# Altium footprint library Connectors.PcbLib: 228 footprints (part 11 of 15)
Each footprint in its own frame and in the unit in brackets; x right, y up, seen from the top. Pads: shape width x height; smd on the part's side, far side on the other; paste and mask are expansions set on the pad; w line width, h text height; cw(c..) or ccw(c..) is an arc to the next point about the centre after c.
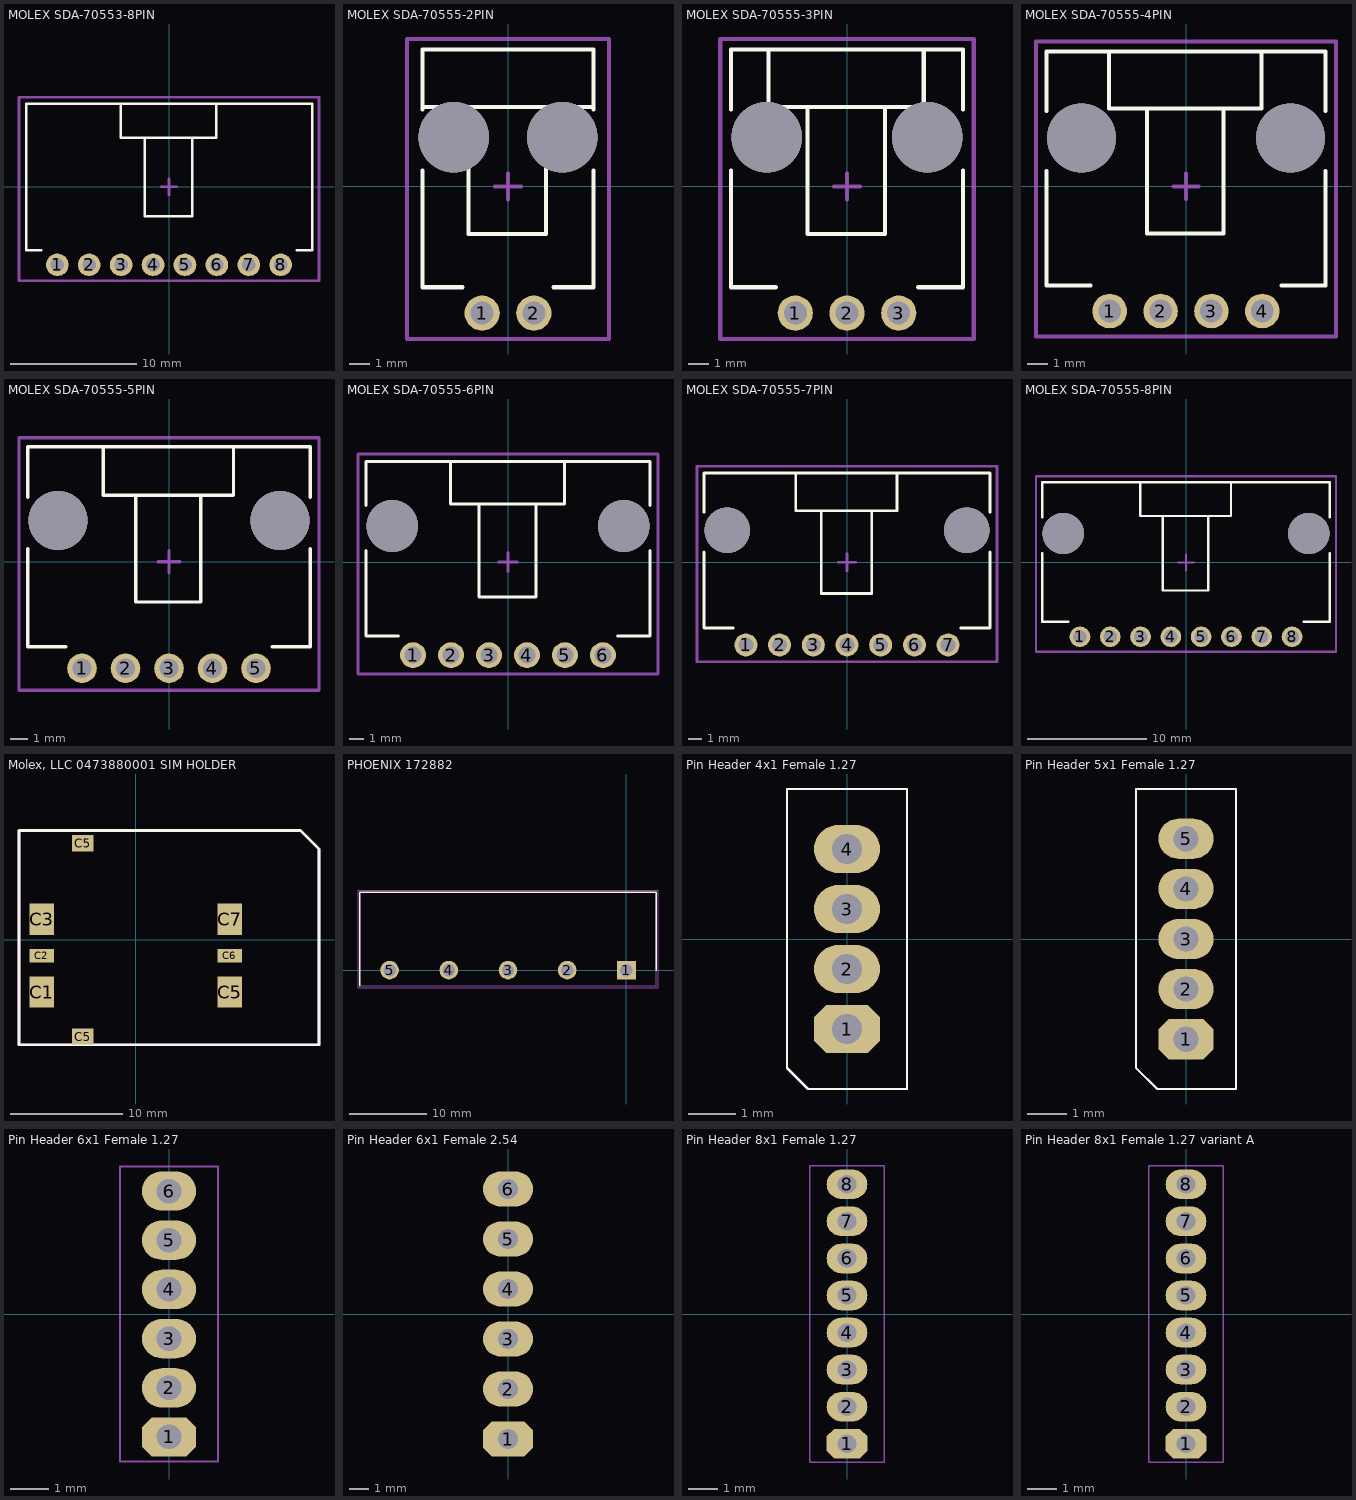
[diagram p10: the footprints below, top view; thin cyan lines are the x and y axes]

## MOLEX SDA-70553-8PIN [mm] "SL Right angle header with latch, 0.100 centres, SDA-70553"
height 6.99
pads (8):
  round 1.8 hole 1.09: 1(-8.89,-6.223) 2(-6.35,-6.223) 3(-3.81,-6.223) 4(-1.27,-6.223) 5(1.27,-6.223) 6(3.81,-6.223) 7(6.35,-6.223) 8(8.89,-6.223)
Top Overlay:
  lines w0.2: -10.16,-5.08 -11.343,-5.08 -11.343,-4.973 -11.343,6.604 11.39,6.604 11.39,-4.973 11.39,-5.08 10.16,-5.08 ; -3.85,6.55 -3.85,3.892 3.77,3.892 3.77,6.55 ; -1.945,3.892 -1.945,-2.346 1.865,-2.346 1.865,3.892
Top Courtyard:
  lines w0.2: -0.635,0 0.635,0 ; 0,-0.635 0,0.635 ; -11.938,-7.493 -11.938,7.112 11.938,7.112 11.938,-7.493 -11.938,-7.493
3D body "705530007.STEP": height 6.96, standoff -3.32, extent -11.39,-6.973 11.47,6.616

## MOLEX SDA-70555-2PIN [mm] "SL Right Angle Header W/LAtch & Trip-Pegs 2.54mm Centres"
height 6.99
pads (2):
  round 1.73 hole 1.13: 1(-1.27,-6.223) 2(1.27,-6.223)
via -2.67,2.417 diameter 3.45 hole 3.45
via 2.67,2.417 diameter 3.45 hole 3.45
Top Overlay:
  lines w0.2: -4.191,0.777 -4.191,-4.953 -2.23,-4.953 ; -4.191,3.777 -4.191,6.731 4.191,6.731 4.191,3.777 ; -4.191,3.892 4.191,3.892 ; -1.945,3.892 -1.945,-2.346 1.865,-2.346 1.865,3.892 ; 2.23,-4.953 4.191,-4.953 4.191,0.777
Top Courtyard:
  lines w0.2: -0.635,0 0.635,0 ; 0,-0.635 0,0.635 ; -4.953,-7.493 -4.953,7.239 4.953,7.239 4.953,-7.493 -4.953,-7.493
3D body "705550001.STEP": height 6.98, standoff -3.3, extent -4.191,-6.923 4.191,6.666

## MOLEX SDA-70555-3PIN [mm] "SL Right Angle Header W/LAtch & Trip-Pegs 2.54mm Centres"
height 6.99
pads (3):
  round 1.73 hole 1.13: 1(-2.54,-6.223) 2(0,-6.223) 3(2.54,-6.223)
via -3.94,2.417 diameter 3.45 hole 3.45
via 3.94,2.417 diameter 3.45 hole 3.45
Top Overlay:
  lines w0.2: -5.7,0.777 -5.7,-4.953 -3.5,-4.953 ; -5.7,3.777 -5.7,6.731 5.7,6.731 5.7,3.777 ; -3.85,6.731 -3.85,3.892 3.77,3.892 3.77,6.731 ; -1.945,3.892 -1.945,-2.346 1.865,-2.346 1.865,3.892 ; 3.5,-4.953 5.7,-4.953 5.7,0.777
Top Courtyard:
  lines w0.2: -0.635,0 0.635,0 ; 0,-0.635 0,0.635 ; -6.223,-7.493 -6.223,7.239 6.223,7.239 6.223,-7.493 -6.223,-7.493
3D body "705550002.STEP": height 6.98, standoff -3.3, extent -5.715,-6.923 5.715,6.666

## MOLEX SDA-70555-4PIN [mm] "SL Right Angle Header W/LAtch & Trip-Pegs 2.54mm Centres"
height 6.99
pads (4):
  round 1.73 hole 1.13: 1(-3.81,-6.223) 2(-1.27,-6.223) 3(1.27,-6.223) 4(3.81,-6.223)
via 5.21,2.417 diameter 3.45 hole 3.45
via -5.21,2.417 diameter 3.45 hole 3.45
Top Overlay:
  lines w0.2: -6.97,0.777 -6.97,-4.953 -4.77,-4.953 ; -6.97,3.777 -6.97,6.731 6.97,6.731 6.97,3.777 ; -3.85,6.731 -3.85,3.892 3.77,3.892 3.77,6.731 ; -1.945,3.892 -1.945,-2.346 1.865,-2.346 1.865,3.892 ; 4.77,-4.953 6.97,-4.953 6.97,0.777
Top Courtyard:
  lines w0.2: -0.635,0 0.635,0 ; 0,-0.635 0,0.635 ; -7.493,-7.493 7.493,-7.493 7.493,7.239 -7.493,7.239 -7.493,-7.493
3D body "705550003.STEP": height 6.98, standoff -3.3, extent -6.985,-6.923 6.985,6.666

## MOLEX SDA-70555-5PIN [mm] "SL Right Angle Header W/LAtch & Trip-Pegs 2.54mm Centres"
height 6.99
pads (5):
  round 1.73 hole 1.13: 1(-5.08,-6.223) 2(-2.54,-6.223) 3(0,-6.223) 4(2.54,-6.223) 5(5.08,-6.223)
via 6.48,2.417 diameter 3.45 hole 3.45
via -6.48,2.417 diameter 3.45 hole 3.45
Top Overlay:
  lines w0.2: -8.24,0.777 -8.24,-4.953 -6.04,-4.953 ; -8.24,3.777 -8.24,6.731 8.24,6.731 8.24,3.777 ; -3.85,6.731 -3.85,3.892 3.77,3.892 3.77,6.731 ; -1.945,3.892 -1.945,-2.346 1.865,-2.346 1.865,3.892 ; 6.04,-4.953 8.24,-4.953 8.24,0.777
Top Courtyard:
  lines w0.2: -0.635,0 0.635,0 ; 0,-0.635 0,0.635 ; -8.763,-7.493 8.763,-7.493 8.763,7.239 -8.763,7.239 -8.763,-7.493
3D body "705550004.STEP": height 6.98, standoff -3.3, extent -8.255,-6.923 8.255,6.666

## MOLEX SDA-70555-6PIN [mm] "SL Right Angle Header W/LAtch & Trip-Pegs 2.54mm Centres"
height 6.99
pads (6):
  round 1.73 hole 1.13: 1(-6.35,-6.223) 2(-3.81,-6.223) 3(-1.27,-6.223) 4(1.27,-6.223) 5(3.81,-6.223) 6(6.35,-6.223)
via 7.75,2.417 diameter 3.45 hole 3.45
via -7.75,2.417 diameter 3.45 hole 3.45
Top Overlay:
  lines w0.2: -9.51,0.777 -9.51,-4.953 -7.31,-4.953 ; -9.51,3.777 -9.51,6.731 9.51,6.731 9.51,3.777 ; -3.85,6.731 -3.85,3.892 3.77,3.892 3.77,6.731 ; -1.945,3.892 -1.945,-2.346 1.865,-2.346 1.865,3.892 ; 7.31,-4.953 9.51,-4.953 9.51,0.777
Top Courtyard:
  lines w0.2: -0.635,0 0.635,0 ; 0,-0.635 0,0.635 ; -10.033,-7.493 10.033,-7.493 10.033,7.239 -10.033,7.239 -10.033,-7.493
3D body "705550005.STEP": height 6.98, standoff -3.3, extent -9.525,-6.923 9.525,6.666

## MOLEX SDA-70555-7PIN [mm] "SL Right Angle Header W/LAtch & Trip-Pegs 2.54mm Centres"
height 6.99
pads (7):
  round 1.73 hole 1.13: 1(-7.62,-6.223) 2(-5.08,-6.223) 3(-2.54,-6.223) 4(0,-6.223) 5(2.54,-6.223) 6(5.08,-6.223) 7(7.62,-6.223)
via -9.02,2.417 diameter 3.45 hole 3.45
via 9.02,2.417 diameter 3.45 hole 3.45
Top Overlay:
  lines w0.2: -10.78,0.777 -10.78,-4.953 -8.58,-4.953 ; -10.78,3.777 -10.78,6.731 10.78,6.731 10.78,3.777 ; -3.85,6.731 -3.85,3.892 3.77,3.892 3.77,6.731 ; -1.945,3.892 -1.945,-2.346 1.865,-2.346 1.865,3.892 ; 8.58,-4.953 10.78,-4.953 10.78,0.777
Top Courtyard:
  lines w0.2: -0.635,0 0.635,0 ; 0,-0.635 0,0.635 ; -11.303,-7.493 -11.303,7.239 11.303,7.239 11.303,-7.493 -11.303,-7.493
3D body "705550006.STEP": height 6.98, standoff -3.3, extent -10.795,-6.923 10.795,6.666

## MOLEX SDA-70555-8PIN [mm] "SL Right Angle Header W/LAtch & Trip-Pegs 2.54mm Centres"
height 6.99
pads (8):
  round 1.73 hole 1.13: 1(-8.89,-6.223) 2(-6.35,-6.223) 3(-3.81,-6.223) 4(-1.27,-6.223) 5(1.27,-6.223) 6(3.81,-6.223) 7(6.35,-6.223) 8(8.89,-6.223)
via -10.29,2.417 diameter 3.45 hole 3.45
via 10.29,2.417 diameter 3.45 hole 3.45
Top Overlay:
  lines w0.2: -12.05,0.777 -12.05,-4.953 -9.85,-4.953 ; -12.05,3.777 -12.05,6.731 12.05,6.731 12.05,3.777 ; -3.85,6.731 -3.85,3.892 3.77,3.892 3.77,6.731 ; -1.945,3.892 -1.945,-2.346 1.865,-2.346 1.865,3.892 ; 9.85,-4.953 12.05,-4.953 12.05,0.777
Top Courtyard:
  lines w0.2: -0.635,0 0.635,0 ; 0,-0.635 0,0.635 ; -12.573,-7.493 -12.573,7.239 12.573,7.239 12.573,-7.493 -12.573,-7.493
3D body "705550007.STEP": height 6.98, standoff -3.3, extent -12.065,-6.923 12.065,6.666

## Molex, LLC 0473880001 SIM HOLDER [mm] "Molex, LLC 0473880001 SIM HOLDER"
pads (8):
  rect 2.2x2.8 smd: C1(-8.4,-4.657) C3(-8.4,1.833) C5(8.4,-4.657) C7(8.4,1.833)
  rect 2.2x1.2 smd: C2(-8.4,-1.407) C6(8.4,-1.407)
  rect 1.95x1.45 smd: C5(-4.735,-8.637) C5(-4.735,8.638)
Top Overlay:
  lines w0.254: -10.425,-9.362 16.375,-9.362 16.375,8.125 14.725,9.775 -10.425,9.775 -10.425,-9.362
Board:
  lines w0.254: -10.425,-9.362 16.375,-9.362 16.375,8.125 14.725,9.775 -10.425,9.775 -10.425,-9.362
Top Courtyard:
  lines w0.254: -10.425,-9.362 16.375,-9.362 16.375,8.125 14.725,9.775 -10.425,9.775 -10.425,-9.362
3D body "473880001.stp": height 1.9, standoff -0.1, extent -9.375,-9.175 16.145,8.925

## PHOENIX 172882 [mm]
pads (5):
  rect 2.4x2.4 hole 1.6: 1(0,0)
  round 2.4 hole 1.6: 2(-7.62,0) 3(-15.24,0) 4(-22.86,0) 5(-30.48,0)
Top Overlay:
  lines w0.2: -34.29,-2 -34.29,10 3.81,10 3.81,0
Top Component Outline:
  lines w0.1: -34.29,-2 -34.29,10 3.81,10 3.81,-2 -34.29,-2
Top Courtyard:
  lines w0.05: -34.54,-2.25 -34.54,10.25 4.06,10.25 4.06,-2.25 -34.54,-2.25
3D body "1728882.stp": height 9.12, standoff -2.98, extent -34.29,-2.002 3.81,10

## Pin Header 4x1 Female 1.27 [mil]
height 425
pads (4):
  oct 55x40 hole 25: 1(0,-75)
  oval 55x40 hole 25: 2(0,-25) 3(0,25) 4(0,75)
Top Overlay:
  lines w1.97: -50,-107.48 -32.48,-125 50,-125 50,125 -50,125 -50,-107.48
Top Component Outline:
  lines w1.97: -50,-107.48 -50,125 50,125 50,-125 -32.48,-125 -50,-107.48

## Pin Header 5x1 Female 1.27 [mil]
height 425
pads (5):
  oct 55x40 hole 25: 1(0,-100)
  oval 55x40 hole 25: 2(0,-50) 3(0,0) 4(0,50) 5(0,100)
Top Overlay:
  lines w1.97: -50,-128.35 -28.74,-149.61 50,-149.61 50,149.61 -50,149.61 -50,-128.35
Top Component Outline:
  lines w1.97: -50,-128.35 -28.74,-149.61 50,-149.61 50,149.61 -50,149.61 -50,-128.35

## Pin Header 6x1 Female 1.27 [mil]
height 425
pads (6):
  oct 55x40 hole 25: 1(0,-125)
  oval 55x40 hole 25: 2(0,-75) 3(0,-25) 4(0,25) 5(0,75) 6(0,125)
Top Component Outline:
  lines w1.97: -50,-150 -50,150 50,150 50,-150 -50,-150
3D body "User Library-DS1031-01-1x6P8BV3-1.STEP": height 181.5, standoff -101.97, extent -49.21,-149.02 49.21,150.98

## Pin Header 6x1 Female 2.54 [mil]
height 425
pads (6):
  oct 100x70 hole 40: 1(0,-250)
  oval 100x70 hole 40: 2(0,-150) 3(0,-50) 4(0,50) 5(0,150) 6(0,250)

## Pin Header 8x1 Female 1.27 [mil]
height 425
pads (8):
  oct 55x40 hole 25: 1(0,-175)
  oval 55x40 hole 25: 2(0,-125) 3(0,-75) 4(0,-25) 5(0,25) 6(0,75) 7(0,125) 8(0,175)
Top Component Outline:
  lines w1.97: -50,-200 -50,200 50,200 50,-200 -50,-200

## Pin Header 8x1 Female 1.27 variant A [mil]
height 425
pads (8):
  oct 55x40 hole 25: 1(0,-175)
  oval 55x40 hole 25: 2(0,-125) 3(0,-75) 4(0,-25) 5(0,25) 6(0,75) 7(0,125) 8(0,175)
Top Solder:
  circle w17.5: c0,-175 r8.75
  circle w17.5: c0,-125 r8.75
  circle w17.5: c0,-75 r8.75
  circle w17.5: c0,-25 r8.75
  circle w17.5: c0,25 r8.75
  circle w17.5: c0,75 r8.75
  circle w17.5: c0,125 r8.75
  circle w17.5: c0,175 r8.75
Top Component Outline:
  lines w1.97: -50,-200 -50,200 50,200 50,-200 -50,-200